# Altium footprint library RES0603.PcbLib: 1 footprints
Each footprint in its own frame and in the unit in brackets; x right, y up, seen from the top. Pads: shape width x height; smd on the part's side, far side on the other; paste and mask are expansions set on the pad; w line width, h text height; cw(c..) or ccw(c..) is an arc to the next point about the centre after c.
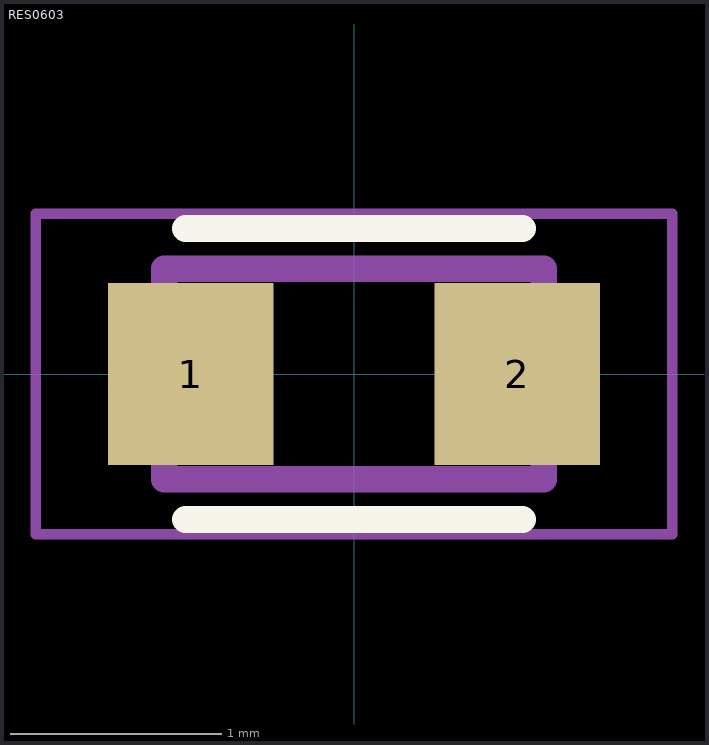
[diagram p0: the footprint, top view; thin cyan lines are the x and y axes]

## RES0603 [mil] "RESC1608X50N"
pads (2):
  rect 31x34 smd: 1(-30.5,0) 2(30.5,0)
Top Overlay:
  lines w5: -31.5,-27.17 31.5,-27.17 ; -31.5,27.17 31.5,27.17
Mechanical 13:
  lines w5: -35.43,-19.68 -35.43,19.68 35.43,19.68 35.43,-19.68 -35.43,-19.68
Mechanical 15:
  lines w1.97: -59.45,-29.92 -59.45,29.92 59.45,29.92 59.45,-29.92 -59.45,-29.92
3D body "RES0603.stp": height 17.72, standoff 0, extent -31.5,-15.75 31.5,15.76